# Altium footprint library DIN41612_32_2row_right_angle_father.PcbLib: 1 footprints
Each footprint in its own frame and in the unit in brackets; x right, y up, seen from the top. Pads: shape width x height; smd on the part's side, far side on the other; paste and mask are expansions set on the pad; w line width, h text height; cw(c..) or ccw(c..) is an arc to the next point about the centre after c.
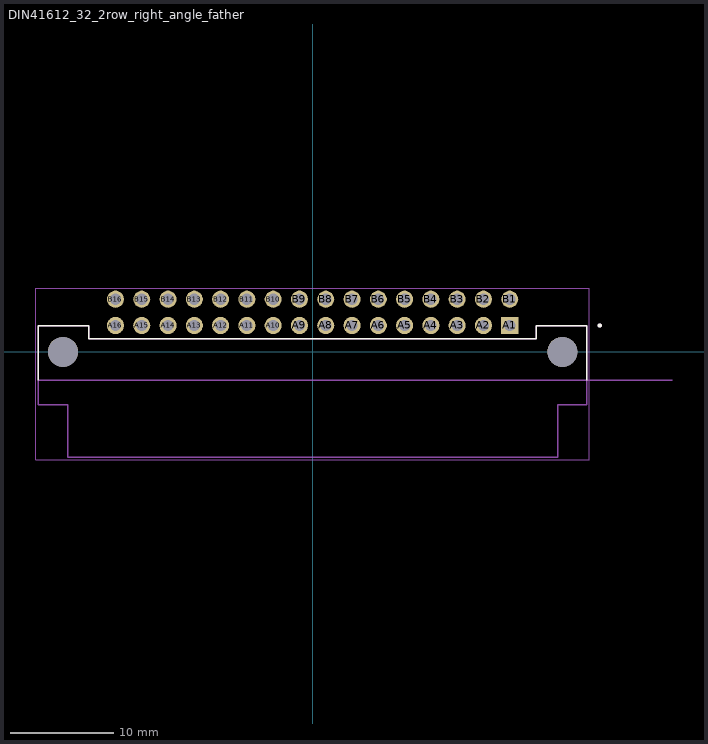
[diagram p0: the footprint, top view; thin cyan lines are the x and y axes]

## DIN41612_32_2row_right_angle_father [mm]
pads (34):
  rect 1.65x1.65 / inner round 1.65 / far side rect 1.65x1.65 hole 1.1: A1(19.05,2.54)
  round 1.65 hole 1.1: A2(16.51,2.54) A3(13.97,2.54) A4(11.43,2.54) A5(8.89,2.54) A6(6.35,2.54) A7(3.81,2.54) A8(1.27,2.54) A9(-1.27,2.54) A10(-3.81,2.54) A11(-6.35,2.54) A12(-8.89,2.54) A13(-11.43,2.54) A14(-13.97,2.54) A15(-16.51,2.54) A16(-19.05,2.54) B1(19.05,5.08) B2(16.51,5.08) B3(13.97,5.08) B4(11.43,5.08) B5(8.89,5.08) B6(6.35,5.08) B7(3.81,5.08) B8(1.27,5.08) B9(-1.27,5.08) B10(-3.81,5.08) B11(-6.35,5.08) B12(-8.89,5.08) B13(-11.43,5.08) B14(-13.97,5.08) B15(-16.51,5.08) B16(-19.05,5.08)
  round 2.9 hole 2.9 unplated: ""(-24.13,0) ""(24.13,0)
Top Overlay:
  circle w0.2: c27.75,2.54 r0.1
  lines w0.127: -26.5,-2.76 -26.5,2.5 -21.63,2.5 -21.63,1.25 21.63,1.25 21.63,2.5 26.5,2.5 26.5,-2.76
Mechanical 13:
  circle w0.2: c27.75,2.54 r0.1
  lines w0.127: 34.75,-2.76 -26.5,-2.76 ; -26.5,-2.76 -26.5,-5.1 -23.68,-5.1 -23.68,-10.2 23.68,-10.2 23.68,-5.1 26.5,-5.1 26.5,2.5 21.63,2.5 21.63,1.25 -21.63,1.25 -21.63,2.5 -26.5,2.5 -26.5,-2.76
  text "PCB EDGE" at 27.5,-2.5 h1
Mechanical 15:
  lines w0.05: -26.75,-10.45 -26.75,6.155 26.75,6.155 26.75,-10.45 -26.75,-10.45
3D body "step_temp.STEP": height 8.47, standoff -1.31, extent -26.525,-10.045 26.535,5.425